# Altium footprint library Clema_CAP.PcbLib: 4 footprints
Each footprint in its own frame and in the unit in brackets; x right, y up, seen from the top. Pads: shape width x height; smd on the part's side, far side on the other; paste and mask are expansions set on the pad; w line width, h text height; cw(c..) or ccw(c..) is an arc to the next point about the centre after c.
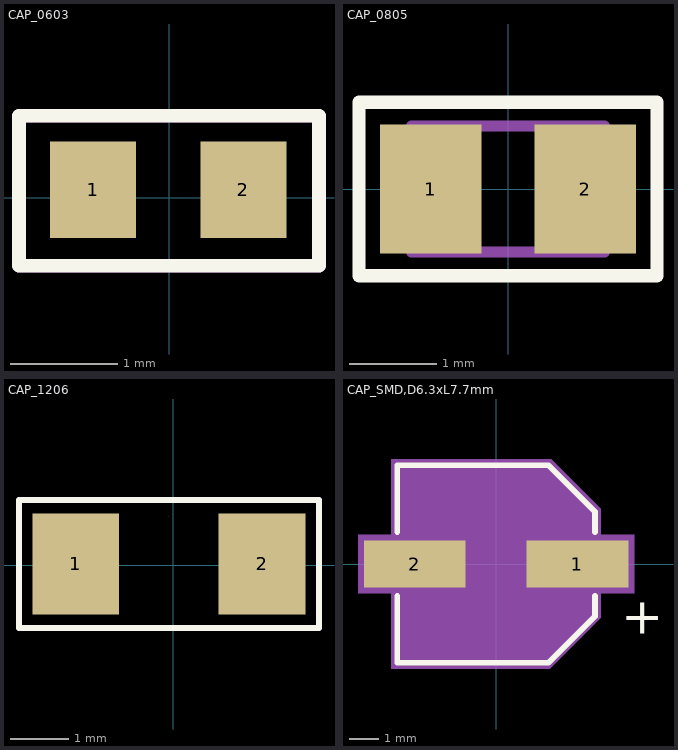
[diagram p0: the footprints below, top view; thin cyan lines are the x and y axes]

## CAP_0603 [mm]
pads (2):
  rect 0.8x0.9 smd: 1(-0.707,0.075) 2(0.693,0.075)
Top Overlay:
  lines w0.127: -1.397,-0.635 -1.397,0.762 1.397,0.762 1.397,-0.635 -1.397,-0.635
Mechanical 15:
  lines w0.003: -0.007,0.796 -0.007,0.797
  lines w0.127: -1.397,-0.635 -1.397,0.762 1.397,0.762 1.397,-0.635 -1.397,-0.635
3D body "0603YC223KAT2A.STEP": height 0.81, standoff 0, extent -0.8,-0.381 0.8,0.519

## CAP_0805 [mm]
pads (2):
  rect 1.16x1.47 smd: 1(-0.88,0) 2(0.88,0)
Top Overlay:
  lines w0.152: -1.702,-0.991 1.702,-0.991 1.702,0.991 -1.702,0.991 -1.702,-0.991
Mechanical 13:
  lines w0.127: -1.1,-0.72 1.1,-0.72 1.1,0.72 -1.1,0.72 -1.1,-0.72
Mechanical 15:
  lines w0.05: -1.713,-0.983 1.713,-0.983 1.713,0.983 -1.713,0.983 -1.713,-0.983
3D body "step_temp.STEP": height 0.94, standoff 0, extent -1.005,-0.625 1.005,0.625

## CAP_1206 [mm]
pads (2):
  rect 1.485x1.728 smd paste-100: 1(-1.671,0.026) 2(1.515,0.026)
Top Overlay:
  lines w0.1: -2.642,-1.067 2.489,-1.067 2.489,1.118 -2.642,1.118 -2.642,-1.067
Top Paste:
  region: 0.772,-0.738 0.772,-0.368 0.872,-0.268 1.177,-0.268 1.277,-0.168 1.277,0.22 1.177,0.32 0.872,0.32 0.772,0.42 0.772,0.79 0.872,0.89 2.157,0.89 2.257,0.79 2.257,-0.738 2.157,-0.838 0.872,-0.838
  region: -0.928,-0.738 -0.928,-0.368 -1.028,-0.268 -1.333,-0.268 -1.433,-0.168 -1.433,0.22 -1.333,0.32 -1.028,0.32 -0.928,0.42 -0.928,0.79 -1.028,0.89 -2.313,0.89 -2.413,0.79 -2.413,-0.738 -2.313,-0.838 -1.028,-0.838
Mechanical 15:
  lines w0.003: -0.078,0.835 -0.078,0.836
  lines w0.1: -2.642,-1.067 2.489,-1.067 2.489,1.118 -2.642,1.118 -2.642,-1.067
3D body "step_temp.STEP": height 1.8, standoff 0, extent -1.676,-0.775 1.524,0.825

## CAP_SMD,D6.3xL7.7mm [mm]
pads (2):
  rect 3.5x1.6 smd: 1(2.8,0) 2(-2.8,0)
Top Overlay:
  lines w0.2: -3.4,-1.1 -3.4,-3.4 1.8,-3.4 3.4,-1.8 3.4,-1.1 ; -3.4,1.1 -3.4,3.4 1.8,3.4 3.4,1.8 3.4,1.1
  text "+" at 4.3,-2.4 h1.27
Mechanical 13:
  circle w0.1: c0,0 r3.15
  lines w0.1: -3.3,-3.3 -3.3,3.3 1.75,3.3 3.3,1.75 3.3,-1.75 1.75,-3.3 -3.3,-3.3
  text "+" at 4.3,-2.4 h1.27
Mechanical 15:
  region: 3.6,1.9 3.6,1 4.75,1 4.75,-1 3.6,-1 3.6,-1.85 1.85,-3.6 -3.6,-3.6 -3.6,-1 -4.75,-1 -4.75,1 -3.6,1 -3.6,3.6 1.9,3.6
3D body "Download_STP_86508xx450xx+(rev1).stp": height 7.68, standoff -0.02, extent -3.65,-3.3 3.65,3.3